# Altium footprint library Miscellaneous Connectors.PcbLib: 245 footprints (part 7 of 16)
Each footprint in its own frame and in the unit in brackets; x right, y up, seen from the top. Pads: shape width x height; smd on the part's side, far side on the other; paste and mask are expansions set on the pad; w line width, h text height; cw(c..) or ccw(c..) is an arc to the next point about the centre after c.
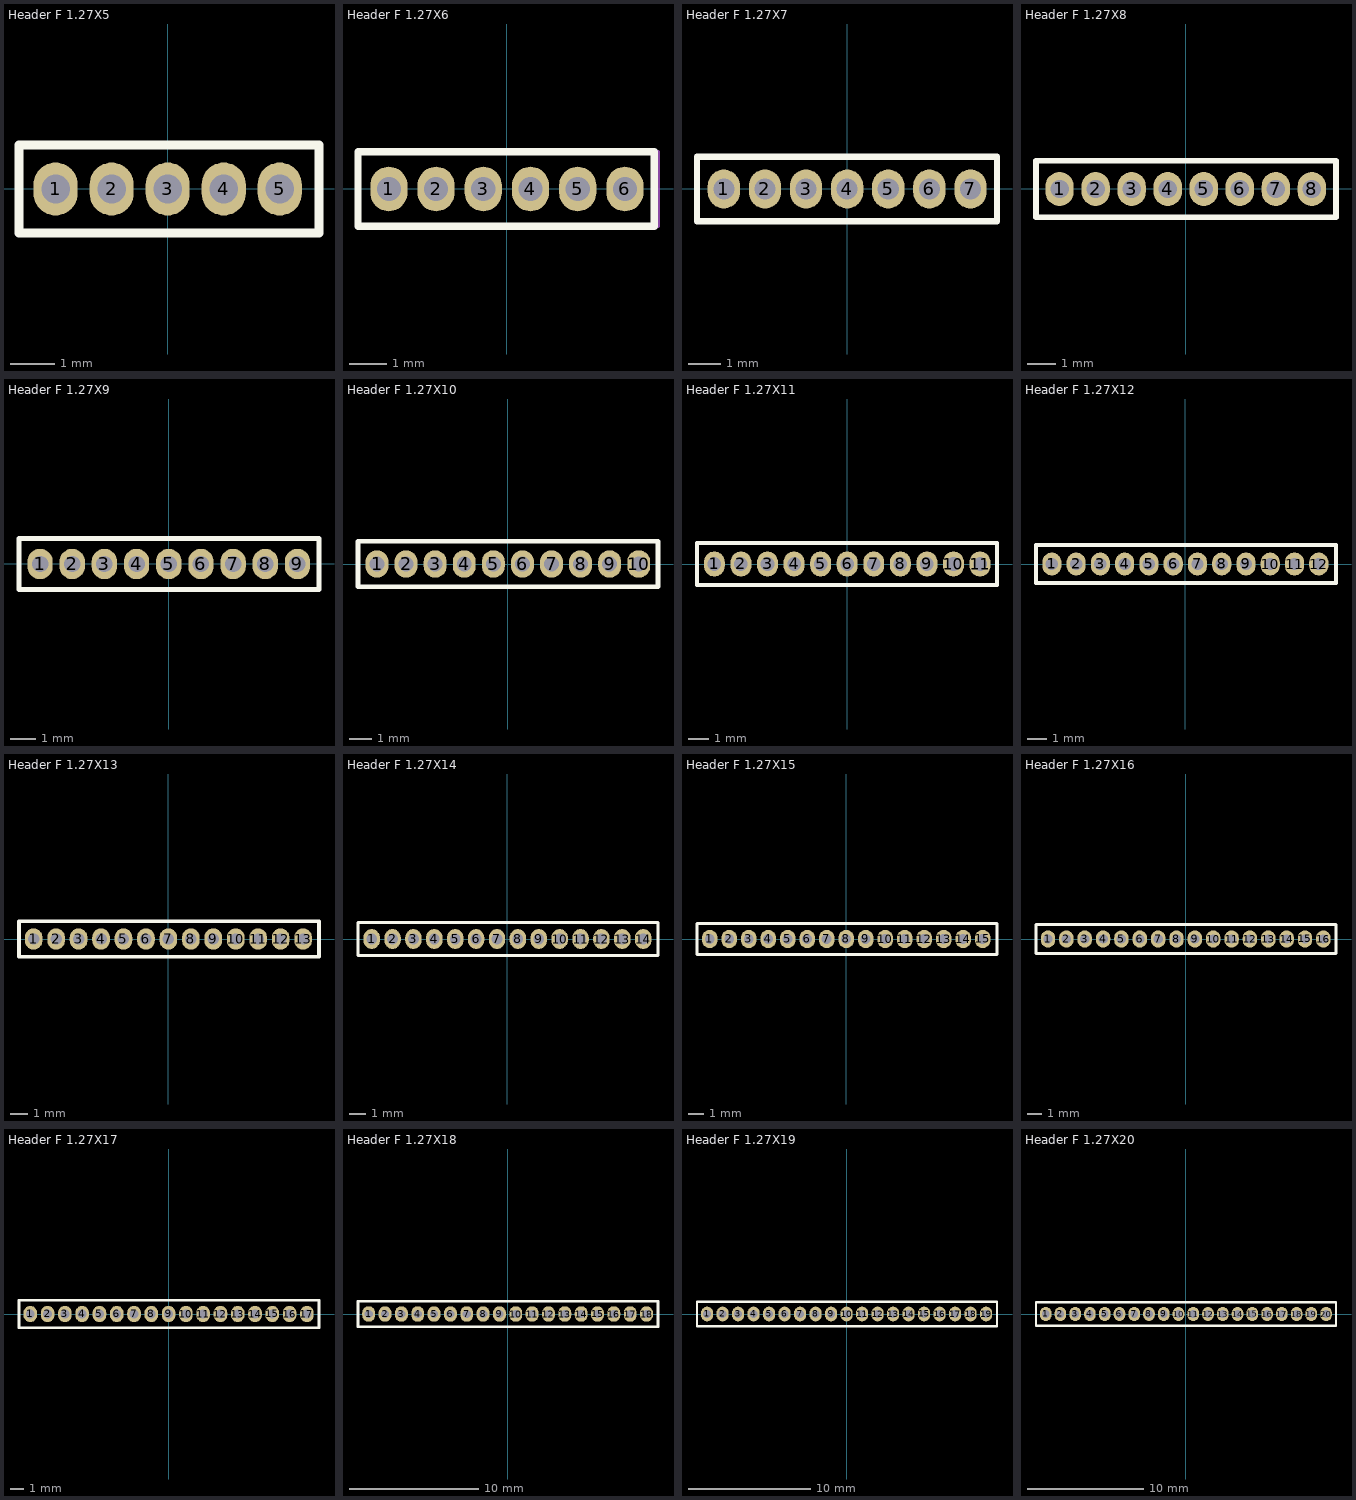
[diagram p6: the footprints below, top view; thin cyan lines are the x and y axes]

## Header F 1.27X5 [mm]
pads (5):
  oval 1x1.2 hole 0.65: 1(-2.54,0) 2(-1.27,0) 3(0,0) 4(1.27,0) 5(2.54,0)
Top Overlay:
  lines w0.2: -3.37,-1 3.43,-1 3.43,1 -3.37,1 -3.37,-1
Mechanical 15:
  lines w0.1: -3.37,-1 -3.37,1 3.43,1 3.43,-1 -3.37,-1
3D body: height 3.4, standoff -2.4, extent -3.375,-0.9 3.375,0.9

## Header F 1.27X6 [mm]
pads (6):
  oval 1x1.2 hole 0.65: 1(-3.175,0) 2(-1.905,0) 3(-0.635,0) 4(0.635,0) 5(1.905,0) 6(3.175,0)
Top Overlay:
  lines w0.2: -4.005,-1 3.965,-1 3.965,1 -4.005,1 -4.005,-1
Mechanical 15:
  lines w0.1: -4.005,-1 -4.005,1 4.065,1 4.065,-1 -4.005,-1
3D body: height 3.4, standoff -2.4, extent -4.01,-0.9 4.01,0.9

## Header F 1.27X7 [mm]
pads (7):
  oval 1x1.2 hole 0.65: 1(-3.81,0) 2(-2.54,0) 3(-1.27,0) 4(0,0) 5(1.27,0) 6(2.54,0) 7(3.81,0)
Top Overlay:
  lines w0.2: -4.64,-1 -4.64,1 4.63,1 4.63,-1 -4.64,-1
Mechanical 15:
  lines w0.1: -4.64,-1 4.63,-1 4.63,1 -4.64,1 -4.64,-1
3D body: height 3.4, standoff -2.4, extent -4.645,-0.9 4.645,0.9

## Header F 1.27X8 [mm]
pads (8):
  oval 1x1.2 hole 0.65: 1(-4.445,0) 2(-3.175,0) 3(-1.905,0) 4(-0.635,0) 5(0.635,0) 6(1.905,0) 7(3.175,0) 8(4.445,0)
Top Overlay:
  lines w0.2: -5.275,-1 5.295,-1 5.295,1 -5.275,1 -5.275,-1
Mechanical 15:
  lines w0.1: -5.275,-1 -5.275,1 5.295,1 5.295,-1 -5.275,-1
3D body: height 3.4, standoff -2.4, extent -5.28,-0.9 5.28,0.9

## Header F 1.27X9 [mm]
pads (9):
  oval 1x1.2 hole 0.65: 1(-5.08,0) 2(-3.81,0) 3(-2.54,0) 4(-1.27,0) 5(0,0) 6(1.27,0) 7(2.54,0) 8(3.81,0) 9(5.08,0)
Top Overlay:
  lines w0.2: -5.91,-1 5.93,-1 5.93,1 -5.91,1 -5.91,-1
Mechanical 15:
  lines w0.1: -5.91,-1 -5.91,1 5.93,1 5.93,-1 -5.91,-1
3D body: height 3.4, standoff -2.4, extent -5.915,-0.9 5.915,0.9

## Header F 1.27X10 [mm]
pads (10):
  oval 1x1.2 hole 0.65: 1(-5.715,0) 2(-4.445,0) 3(-3.175,0) 4(-1.905,0) 5(-0.635,0) 6(0.635,0) 7(1.905,0) 8(3.175,0) 9(4.445,0) 10(5.715,0)
Top Overlay:
  lines w0.2: -6.545,-1 -6.545,1 6.555,1 6.555,-1 -6.545,-1
Mechanical 15:
  lines w0.1: -6.545,-1 6.555,-1 6.555,1 -6.545,1 -6.545,-1
3D body: height 3.4, standoff -2.4, extent -6.55,-0.9 6.55,0.9

## Header F 1.27X11 [mm]
pads (11):
  oval 1x1.2 hole 0.65: 1(-6.35,0) 2(-5.08,0) 3(-3.81,0) 4(-2.54,0) 5(-1.27,0) 6(0,0) 7(1.27,0) 8(2.54,0) 9(3.81,0) 10(5.08,0) 11(6.35,0)
Top Overlay:
  lines w0.2: -7.18,-1 -7.18,1 7.16,1 7.16,-1 -7.18,-1
Mechanical 15:
  lines w0.1: -7.18,-1 7.16,-1 7.16,1 -7.18,1 -7.18,-1
3D body: height 3.4, standoff -2.4, extent -7.185,-0.9 7.185,0.9

## Header F 1.27X12 [mm]
pads (12):
  oval 1x1.2 hole 0.65: 1(-6.985,0) 2(-5.715,0) 3(-4.445,0) 4(-3.175,0) 5(-1.905,0) 6(-0.635,0) 7(0.635,0) 8(1.905,0) 9(3.175,0) 10(4.445,0) 11(5.715,0) 12(6.985,0)
Top Overlay:
  lines w0.2: -7.815,-1 7.885,-1 7.885,1 -7.815,1 -7.815,-1
Mechanical 15:
  lines w0.1: -7.815,-1 -7.815,1 7.885,1 7.885,-1 -7.815,-1
3D body: height 3.4, standoff -2.4, extent -7.82,-0.9 7.82,0.9

## Header F 1.27X13 [mm]
pads (13):
  oval 1x1.2 hole 0.65: 1(-7.62,0) 2(-6.35,0) 3(-5.08,0) 4(-3.81,0) 5(-2.54,0) 6(-1.27,0) 7(0,0) 8(1.27,0) 9(2.54,0) 10(3.81,0) 11(5.08,0) 12(6.35,0) 13(7.62,0)
Top Overlay:
  lines w0.2: -8.45,-1 -8.45,1 8.52,1 8.52,-1 -8.45,-1
Mechanical 15:
  lines w0.1: -8.45,-1 8.52,-1 8.52,1 -8.45,1 -8.45,-1
3D body: height 3.4, standoff -2.4, extent -8.455,-0.9 8.455,0.9

## Header F 1.27X14 [mm]
pads (14):
  oval 1x1.2 hole 0.65: 1(-8.255,0) 2(-6.985,0) 3(-5.715,0) 4(-4.445,0) 5(-3.175,0) 6(-1.905,0) 7(-0.635,0) 8(0.635,0) 9(1.905,0) 10(3.175,0) 11(4.445,0) 12(5.715,0) 13(6.985,0) 14(8.255,0)
Top Overlay:
  lines w0.2: -9.085,-1 9.155,-1 9.155,1 -9.085,1 -9.085,-1
Mechanical 15:
  lines w0.1: -9.085,-1 -9.085,1 9.155,1 9.155,-1 -9.085,-1
3D body: height 3.4, standoff -2.4, extent -9.09,-0.9 9.09,0.9

## Header F 1.27X15 [mm]
pads (15):
  oval 1x1.2 hole 0.65: 1(-8.89,0) 2(-7.62,0) 3(-6.35,0) 4(-5.08,0) 5(-3.81,0) 6(-2.54,0) 7(-1.27,0) 8(0,0) 9(1.27,0) 10(2.54,0) 11(3.81,0) 12(5.08,0) 13(6.35,0) 14(7.62,0) 15(8.89,0)
Top Overlay:
  lines w0.2: -9.72,-1 9.82,-1 9.82,1 -9.72,1 -9.72,-1
Mechanical 15:
  lines w0.1: -9.72,-1 -9.72,1 9.82,1 9.82,-1 -9.72,-1
3D body: height 3.4, standoff -2.4, extent -9.725,-0.9 9.725,0.9

## Header F 1.27X16 [mm]
pads (16):
  oval 1x1.2 hole 0.65: 1(-9.525,0) 2(-8.255,0) 3(-6.985,0) 4(-5.715,0) 5(-4.445,0) 6(-3.175,0) 7(-1.905,0) 8(-0.635,0) 9(0.635,0) 10(1.905,0) 11(3.175,0) 12(4.445,0) 13(5.715,0) 14(6.985,0) 15(8.255,0) 16(9.525,0)
Top Overlay:
  lines w0.2: -10.355,-1 10.4,-1 10.4,1 -10.355,1 -10.355,-1
Mechanical 15:
  lines w0.1: -10.355,-1 -10.355,1 10.4,1 10.4,-1 -10.355,-1
3D body: height 3.4, standoff -2.4, extent -10.36,-0.9 10.36,0.9

## Header F 1.27X17 [mm]
pads (17):
  oval 1x1.2 hole 0.65: 1(-10.16,0) 2(-8.89,0) 3(-7.62,0) 4(-6.35,0) 5(-5.08,0) 6(-3.81,0) 7(-2.54,0) 8(-1.27,0) 9(0,0) 10(1.27,0) 11(2.54,0) 12(3.81,0) 13(5.08,0) 14(6.35,0) 15(7.62,0) 16(8.89,0) 17(10.16,0)
Top Overlay:
  lines w0.2: -10.99,-1 -10.99,1 11.05,1 11.05,-1 -10.99,-1
Mechanical 15:
  lines w0.1: -10.99,-1 11.05,-1 11.05,1 -10.99,1 -10.99,-1
3D body: height 3.4, standoff -2.4, extent -10.995,-0.9 10.995,0.9

## Header F 1.27X18 [mm]
pads (18):
  oval 1x1.2 hole 0.65: 1(-10.795,0) 2(-9.525,0) 3(-8.255,0) 4(-6.985,0) 5(-5.715,0) 6(-4.445,0) 7(-3.175,0) 8(-1.905,0) 9(-0.635,0) 10(0.635,0) 11(1.905,0) 12(3.175,0) 13(4.445,0) 14(5.715,0) 15(6.985,0) 16(8.255,0) 17(9.525,0) 18(10.795,0)
Top Overlay:
  lines w0.2: -11.625,-1 11.685,-1 11.685,1 -11.625,1 -11.625,-1
Mechanical 15:
  lines w0.1: -11.625,-1 -11.625,1 11.685,1 11.685,-1 -11.625,-1
3D body: height 3.4, standoff -2.4, extent -11.63,-0.9 11.63,0.9

## Header F 1.27X19 [mm]
pads (19):
  oval 1x1.2 hole 0.65: 1(-11.43,0) 2(-10.16,0) 3(-8.89,0) 4(-7.62,0) 5(-6.35,0) 6(-5.08,0) 7(-3.81,0) 8(-2.54,0) 9(-1.27,0) 10(0,0) 11(1.27,0) 12(2.54,0) 13(3.81,0) 14(5.08,0) 15(6.35,0) 16(7.62,0) 17(8.89,0) 18(10.16,0) 19(11.43,0)
Top Overlay:
  lines w0.2: -12.26,-1 12.32,-1 12.32,1 -12.26,1 -12.26,-1
Mechanical 15:
  lines w0.1: -12.26,-1 -12.26,1 12.32,1 12.32,-1 -12.26,-1
3D body: height 3.4, standoff -2.4, extent -12.265,-0.9 12.265,0.9

## Header F 1.27X20 [mm]
pads (20):
  oval 1x1.2 hole 0.65: 1(-12.065,0) 2(-10.795,0) 3(-9.525,0) 4(-8.255,0) 5(-6.985,0) 6(-5.715,0) 7(-4.445,0) 8(-3.175,0) 9(-1.905,0) 10(-0.635,0) 11(0.635,0) 12(1.905,0) 13(3.175,0) 14(4.445,0) 15(5.715,0) 16(6.985,0) 17(8.255,0) 18(9.525,0) 19(10.795,0) 20(12.065,0)
Top Overlay:
  lines w0.2: -12.895,-1 12.915,-1 12.915,1 -12.895,1 -12.895,-1
Mechanical 15:
  lines w0.1: -12.895,-1 -12.895,1 12.915,1 12.915,-1 -12.895,-1
3D body: height 3.4, standoff -2.4, extent -12.9,-0.9 12.9,0.9